# Altium footprint library FootPrintLib_10.PcbLib: 270 footprints (part 15 of 17)
Each footprint in its own frame and in the unit in brackets; x right, y up, seen from the top. Pads: shape width x height; smd on the part's side, far side on the other; paste and mask are expansions set on the pad; w line width, h text height; cw(c..) or ccw(c..) is an arc to the next point about the centre after c.
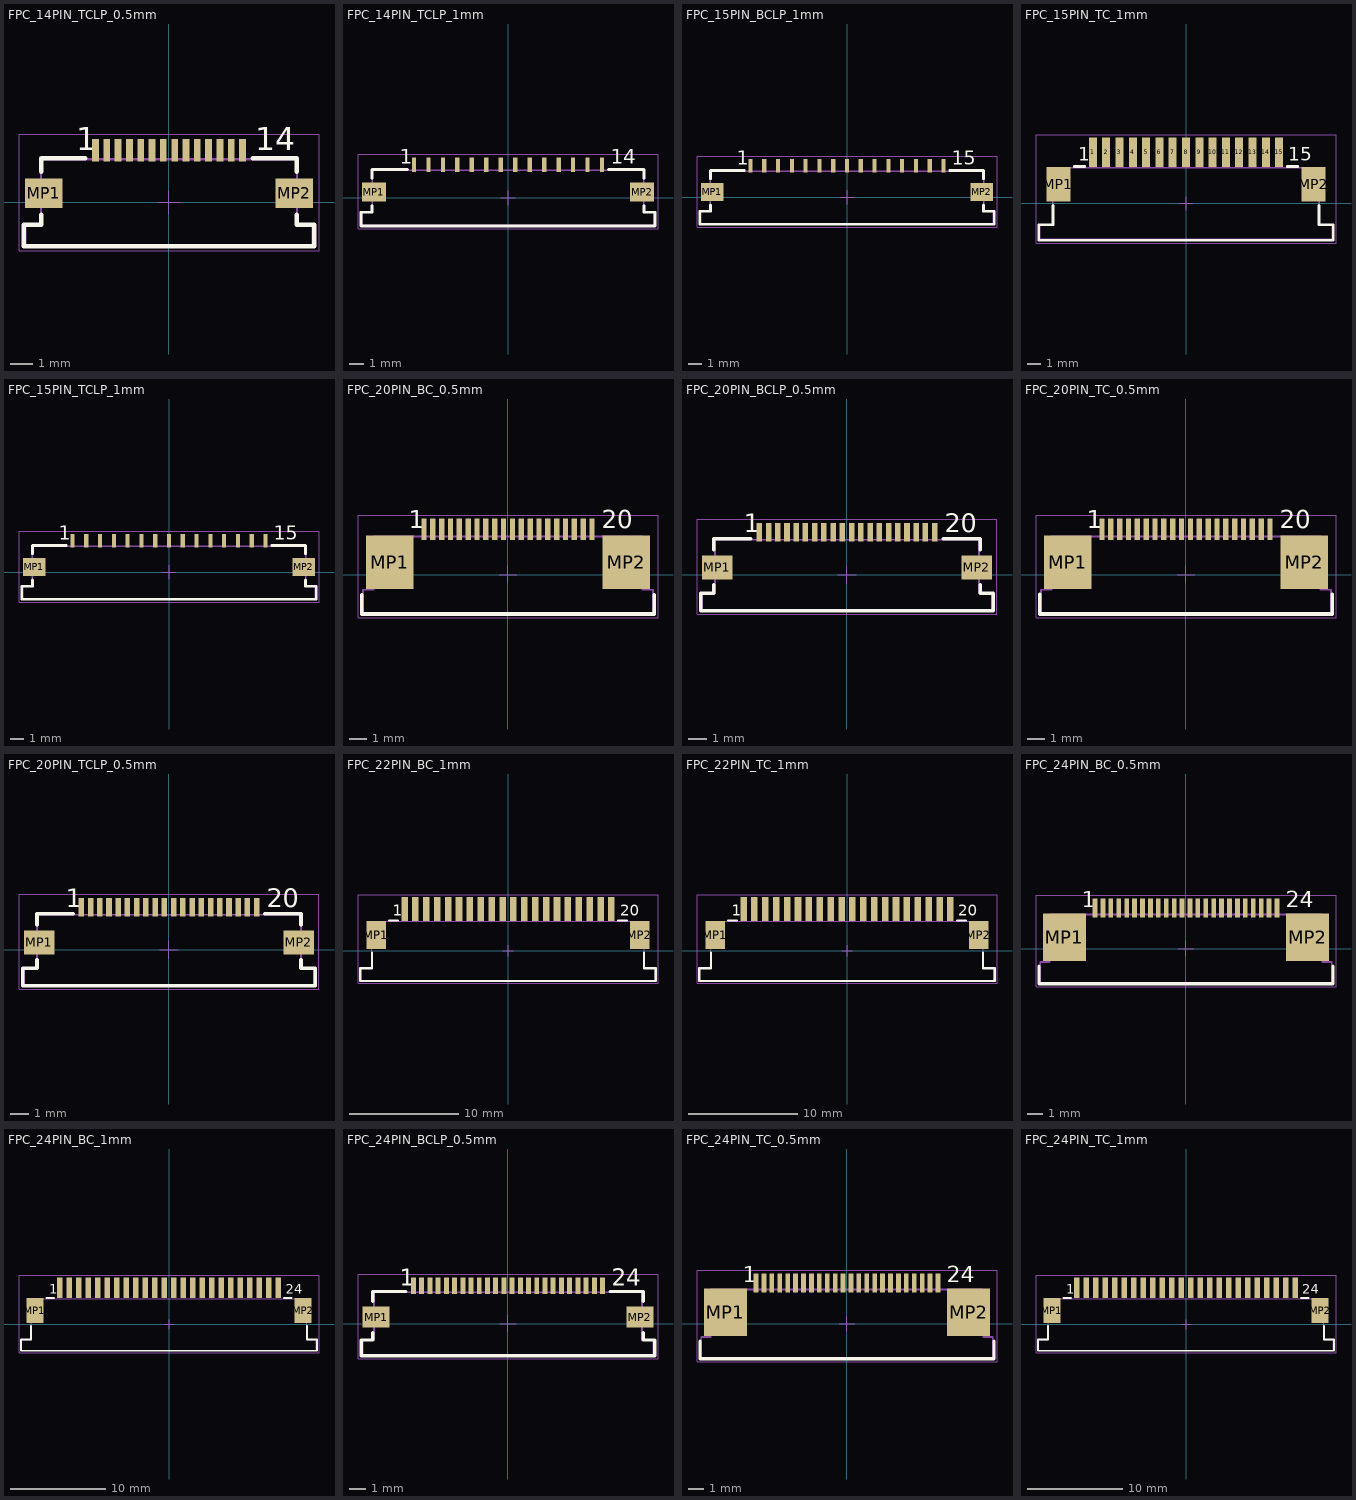
[diagram p14: the footprints below, top view; thin cyan lines are the x and y axes]

## FPC_14PIN_TCLP_0.5mm [mm] "ZIF Connectors, Horizontal, Top Contact Low Profile, pitch 0.5mm, 14p"
height 1.3
pads (16):
  rect 0.3x1 smd: 1(-3.25,2.3) 2(-2.75,2.3) 3(-2.25,2.3) 4(-1.75,2.3) 5(-1.25,2.3) 6(-0.75,2.3) 7(-0.25,2.3) 8(0.25,2.3) 9(0.75,2.3) 10(1.25,2.3) 11(1.75,2.3) 12(2.25,2.3) 13(2.75,2.3) 14(3.25,2.3)
  rect 1.65x1.3 smd: MP1(-5.525,0.4) MP2(5.525,0.4)
Top Overlay:
  lines w0.2: -5.65,-0.55 -5.65,-1 -6.425,-1 -6.425,-1.95 6.425,-1.95 6.425,-1 5.65,-1 5.65,-0.55 ; -5.65,1.35 -5.65,1.95 -3.7,1.95 ; 3.7,1.95 5.65,1.95 5.65,1.35
  text "14" at 3.8,2.3 h1.02
  text "1" at -4.1,2.3 h1.02
Mechanical 13:
  lines w0.1: -6.35,-1.9 -6.35,-1 -5.65,-1 -5.65,1.9 5.65,1.9 5.65,-1 6.35,-1 6.35,-1.9 -6.35,-1.9
Mechanical 15:
  lines w0.05: -0.5,0 0.5,0 ; 0,-0.5 0,0.5 ; -6.625,-2.15 -6.625,3 6.625,3 6.625,-2.15 -6.625,-2.15
3D body "687114183622.stp": height 1.28, standoff -0.01, extent -6.35,-1.9 6.35,2.35

## FPC_14PIN_TCLP_1mm [mm] "ZIF Connectors, Horizontal, Top Contact Low Profile, pitch 1mm, 14p"
height 1.3
pads (16):
  rect 0.3x1 smd: 1(-6.5,2.3) 2(-5.5,2.3) 3(-4.5,2.3) 4(-3.5,2.3) 5(-2.5,2.3) 6(-1.5,2.3) 7(-0.5,2.3) 8(0.5,2.3) 9(1.5,2.3) 10(2.5,2.3) 11(3.5,2.3) 12(4.5,2.3) 13(5.5,2.3) 14(6.5,2.3)
  rect 1.65x1.3 smd: MP1(-9.275,0.4) MP2(9.275,0.4)
Top Overlay:
  lines w0.2: -9.4,-0.55 -9.4,-1 -10.175,-1 -10.175,-1.95 10.175,-1.95 10.175,-1 9.4,-1 9.4,-0.55 ; -9.4,1.35 -9.4,1.95 -6.95,1.95 ; 6.95,1.95 9.4,1.95 9.4,1.35
  text "1" at -7.5,2.35 h1.02
  text "14" at 7.1,2.35 h1.02
Mechanical 13:
  lines w0.1: -10.1,-1 -10.1,-1.9 10.1,-1.9 10.1,-1 9.4,-1 9.4,1.9 -9.4,1.9 -9.4,-1 -10.1,-1 ; -10.1,-1 -10.1,-1
Mechanical 15:
  lines w0.05: -0.5,0 0.5,0 ; 0,-0.5 0,0.5 ; -10.375,-2.15 -10.375,3 10.375,3 10.375,-2.15 -10.375,-2.15
3D body "686114183422.stp": height 1.28, standoff -0.01, extent -10.1,-1.9 10.1,2.35

## FPC_15PIN_BCLP_1mm [mm] "ZIF Connectors, Horizontal, Bottom Contact Low Profile, pitch 1mm, 15p"
height 1.3
pads (17):
  rect 0.3x1 smd: 1(-7,2.3) 2(-6,2.3) 3(-5,2.3) 4(-4,2.3) 5(-3,2.3) 6(-2,2.3) 7(-1,2.3) 8(0,2.3) 9(1,2.3) 10(2,2.3) 11(3,2.3) 12(4,2.3) 13(5,2.3) 14(6,2.3) 15(7,2.3)
  rect 1.65x1.3 smd: MP1(-9.775,0.4) MP2(9.775,0.4)
Top Overlay:
  lines w0.2: -9.9,-0.55 -9.9,-1 -10.675,-1 -10.675,-1.95 10.675,-1.95 10.675,-1 9.9,-1 9.9,-0.55 ; -9.9,1.35 -9.9,1.95 -7.45,1.95 ; 7.45,1.95 9.9,1.95 9.9,1.35
  text "1" at -8,2.35 h1.02
  text "15" at 7.6,2.35 h1.02
Mechanical 13:
  lines w0.1: -10.6,-1 -10.6,-1.9 10.6,-1.9 10.6,-1 9.9,-1 9.9,1.9 -9.9,1.9 -9.9,-1 -10.6,-1 ; -10.6,-1 -10.6,-1
Mechanical 15:
  lines w0.05: -0.5,0 0.5,0 ; 0,-0.5 0,0.5 ; -10.875,-2.15 -10.875,3 10.875,3 10.875,-2.15 -10.875,-2.15
3D body "686115183522.stp": height 1.24, standoff -0.01, extent -10.6,-1.9 10.6,2.35

## FPC_15PIN_TC_1mm [mm] "ZIF Connectors, Horizontal, Top Contact, pitch 1mm, 15p"
height 3.15
pads (17):
  rect 0.6x2.2 smd: 1(-7,3.85) 2(-6,3.85) 3(-5,3.85) 4(-4,3.85) 5(-3,3.85) 6(-2,3.85) 7(-1,3.85) 8(0,3.85) 9(1,3.85) 10(2,3.85) 11(3,3.85) 12(4,3.85) 13(5,3.85) 14(6,3.85) 15(7,3.85)
  rect 1.8x2.6 smd: MP1(-9.6,1.45) MP2(9.6,1.45)
Top Overlay:
  lines w0.2: -10,-0.15 -10,-1.6 -11.075,-1.6 -11.075,-2.775 11.075,-2.775 11.075,-1.6 10,-1.6 10,-0.15 ; -8.4,2.775 -7.6,2.775 ; 7.6,2.775 8.4,2.775
  text "15" at 7.7,3.2 h1.02
  text "1" at -8.1,3.2 h1.02
Mechanical 13:
  lines w0.1: -11,-2.7 11,-2.7 11,-1.6 10,-1.6 10,2.7 -10,2.7 -10,-1.6 -11,-1.6 -11,-2.7
Mechanical 15:
  lines w0.05: -0.5,0 0.5,0 ; 0,-0.5 0,0.5 ; -11.275,-2.975 -11.275,5.15 11.275,5.15 11.275,-2.975 -11.275,-2.975
3D body "68611514122.stp": height 3.02, standoff 0.02, extent -11,-2.7 11,4.4

## FPC_15PIN_TCLP_1mm [mm] "ZIF Connectors, Horizontal, Top Contact Low Profile, pitch 1mm, 15p"
height 1.3
pads (17):
  rect 0.3x1 smd: 1(-7,2.3) 2(-6,2.3) 3(-5,2.3) 4(-4,2.3) 5(-3,2.3) 6(-2,2.3) 7(-1,2.3) 8(0,2.3) 9(1,2.3) 10(2,2.3) 11(3,2.3) 12(4,2.3) 13(5,2.3) 14(6,2.3) 15(7,2.3)
  rect 1.65x1.3 smd: MP1(-9.775,0.4) MP2(9.775,0.4)
Top Overlay:
  lines w0.2: -9.9,-0.55 -9.9,-1 -10.675,-1 -10.675,-1.95 10.675,-1.95 10.675,-1 9.9,-1 9.9,-0.55 ; -9.9,1.35 -9.9,1.95 -7.45,1.95 ; 7.45,1.95 9.9,1.95 9.9,1.35
  text "1" at -8,2.35 h1.02
  text "15" at 7.6,2.35 h1.02
Mechanical 13:
  lines w0.1: -10.6,-1 -9.9,-1 -9.9,1.9 9.9,1.9 9.9,-1 10.6,-1 10.6,-1.9 -10.6,-1.9 -10.6,-1 ; -10.6,-1 -10.6,-1
Mechanical 15:
  lines w0.05: -0.5,0 0.5,0 ; 0,-0.5 0,0.5 ; -10.875,-2.15 10.875,-2.15 10.875,3 -10.875,3 -10.875,-2.15
3D body "686115183422.stp": height 1.28, standoff -0.01, extent -10.6,-1.9 10.6,2.35

## FPC_20PIN_BC_0.5mm [mm] "ZIF Connectors, Horizontal, Bottom Contact, pitch 0.5mm, 20p"
height 2.25
pads (22):
  rect 0.3x1.2 smd: 1(-4.75,2.56) 2(-4.25,2.56) 3(-3.75,2.56) 4(-3.25,2.56) 5(-2.75,2.56) 6(-2.25,2.56) 7(-1.75,2.56) 8(-1.25,2.56) 9(-0.75,2.56) 10(-0.25,2.56) 11(0.25,2.56) 12(0.75,2.56) 13(1.25,2.56) 14(1.75,2.56) 15(2.25,2.56) 16(2.75,2.56) 17(3.25,2.56) 18(3.75,2.56) 19(4.25,2.56) 20(4.75,2.56)
  rect 2.7x3 smd: MP1(-6.68,0.7) MP2(6.68,0.7)
Top Overlay:
  lines w0.2: -8.275,-1.125 -8.275,-2.225 8.275,-2.225 8.275,-1.125
  text "1" at -5.6,2.61 h1.02
  text "20" at 5.3,2.61 h1.02
Mechanical 13:
  lines w0.1: -8.2,-2.15 8.2,-2.15 8.2,-0.85 7.6,-0.85 7.6,2.15 -7.6,2.15 -7.6,-0.85 -8.2,-0.85 -8.2,-2.15
Mechanical 15:
  lines w0.05: -0.5,0 0.5,0 ; 0,-0.5 0,0.5 ; -8.475,-2.425 -8.475,3.36 8.475,3.36 8.475,-2.425 -8.475,-2.425
3D body "68712014522.stp": height 2.1, standoff 0, extent -8.2,-2.15 8.2,2.95

## FPC_20PIN_BCLP_0.5mm [mm] "ZIF Connectors, Horizontal, Bottom Contact Low Profile, pitch 0.5mm, 20p"
height 1.3
pads (22):
  rect 0.3x1 smd: 1(-4.75,2.3) 2(-4.25,2.3) 3(-3.75,2.3) 4(-3.25,2.3) 5(-2.75,2.3) 6(-2.25,2.3) 7(-1.75,2.3) 8(-1.25,2.3) 9(-0.75,2.3) 10(-0.25,2.3) 11(0.25,2.3) 12(0.75,2.3) 13(1.25,2.3) 14(1.75,2.3) 15(2.25,2.3) 16(2.75,2.3) 17(3.25,2.3) 18(3.75,2.3) 19(4.25,2.3) 20(4.75,2.3)
  rect 1.65x1.3 smd: MP1(-7.025,0.4) MP2(7.025,0.4)
Top Overlay:
  lines w0.2: -7.225,-0.55 -7.225,-1 -7.925,-1 -7.925,-1.95 7.925,-1.95 7.925,-1 7.225,-1 7.225,-0.55 ; -7.225,1.35 -7.225,1.95 -5.225,1.95 ; 5.225,1.95 7.225,1.95 7.225,1.35
  text "20" at 5.3,2.3 h1.02
  text "1" at -5.6,2.3 h1.02
Mechanical 13:
  lines w0.1: -7.85,-1.9 -7.85,-1 -7.15,-1 -7.15,1.9 7.15,1.9 7.15,-1 7.85,-1 7.85,-1.9 -7.85,-1.9
Mechanical 15:
  lines w0.05: -0.5,0 0.5,0 ; 0,-0.5 0,0.5 ; -8.125,-2.15 -8.125,3 8.125,3 8.125,-2.15 -8.125,-2.15
3D body "687120183722.stp": height 1.28, standoff -0.01, extent -7.85,-1.9 7.85,2.35

## FPC_20PIN_TC_0.5mm [mm] "ZIF Connectors, Horizontal, Top Contact, pitch 0.5mm, 20p"
height 2.25
pads (22):
  rect 0.3x1.2 smd: 1(-4.75,2.56) 2(-4.25,2.56) 3(-3.75,2.56) 4(-3.25,2.56) 5(-2.75,2.56) 6(-2.25,2.56) 7(-1.75,2.56) 8(-1.25,2.56) 9(-0.75,2.56) 10(-0.25,2.56) 11(0.25,2.56) 12(0.75,2.56) 13(1.25,2.56) 14(1.75,2.56) 15(2.25,2.56) 16(2.75,2.56) 17(3.25,2.56) 18(3.75,2.56) 19(4.25,2.56) 20(4.75,2.56)
  rect 2.7x3 smd: MP1(-6.68,0.7) MP2(6.68,0.7)
Top Overlay:
  lines w0.2: -8.275,-1.1 -8.275,-2.225 8.275,-2.225 8.275,-1.1
  text "20" at 5.3,2.61 h1.02
  text "1" at -5.6,2.61 h1.02
Mechanical 13:
  lines w0.1: -8.2,-2.15 8.2,-2.15 8.2,-0.85 7.6,-0.85 7.6,2.15 -7.6,2.15 -7.6,-0.85 -8.2,-0.85 -8.2,-2.15
Mechanical 15:
  lines w0.05: -0.5,0 0.5,0 ; 0,-0.5 0,0.5 ; -8.475,-2.425 8.475,-2.425 8.475,3.36 -8.475,3.36 -8.475,-2.425
3D body "68712014022.stp": height 2.1, standoff 0, extent -8.2,-2.15 8.2,2.95

## FPC_20PIN_TCLP_0.5mm [mm] "ZIF Connectors, Horizontal, Top Contact Low Profile, pitch 0.5mm, 20p"
height 1.3
pads (22):
  rect 0.3x1 smd: 1(-4.75,2.3) 2(-4.25,2.3) 3(-3.75,2.3) 4(-3.25,2.3) 5(-2.75,2.3) 6(-2.25,2.3) 7(-1.75,2.3) 8(-1.25,2.3) 9(-0.75,2.3) 10(-0.25,2.3) 11(0.25,2.3) 12(0.75,2.3) 13(1.25,2.3) 14(1.75,2.3) 15(2.25,2.3) 16(2.75,2.3) 17(3.25,2.3) 18(3.75,2.3) 19(4.25,2.3) 20(4.75,2.3)
  rect 1.65x1.3 smd: MP1(-7.025,0.4) MP2(7.025,0.4)
Top Overlay:
  lines w0.2: -7.15,-0.55 -7.15,-1 -7.925,-1 -7.925,-1.95 7.925,-1.95 7.925,-1 7.15,-1 7.15,-0.55 ; -7.15,1.35 -7.15,1.95 -5.2,1.95 ; 5.2,1.95 7.15,1.95 7.15,1.35
  text "1" at -5.6,2.3 h1.02
  text "20" at 5.3,2.3 h1.02
Mechanical 13:
  lines w0.1: -7.85,-1.9 -7.85,-1 -7.15,-1 -7.15,1.9 7.15,1.9 7.15,-1 7.85,-1 7.85,-1.9 -7.85,-1.9
Mechanical 15:
  lines w0.05: -0.5,0 0.5,0 ; 0,-0.5 0,0.5 ; -8.125,-2.15 -8.125,3 8.125,3 8.125,-2.15 -8.125,-2.15
3D body "687120183622.stp": height 1.28, standoff -0.01, extent -7.85,-1.9 7.85,2.35

## FPC_22PIN_BC_1mm [mm] "ZIF Connectors, Horizontal, Bottom Contact, pitch 1mm, 20p"
height 3.15
pads (22):
  rect 0.6x2.2 smd: 1(-9.5,3.85) 2(-8.5,3.85) 3(-7.5,3.85) 4(-6.5,3.85) 5(-5.5,3.85) 6(-4.5,3.85) 7(-3.5,3.85) 8(-2.5,3.85) 9(-1.5,3.85) 10(-0.5,3.85) 11(0.5,3.85) 12(1.5,3.85) 13(2.5,3.85) 14(3.5,3.85) 15(4.5,3.85) 16(5.5,3.85) 17(6.5,3.85) 18(7.5,3.85) 19(8.5,3.85) 20(9.5,3.85)
  rect 1.8x2.6 smd: MP1(-12.1,1.45) MP2(12.1,1.45)
Top Overlay:
  lines w0.2: -12.5,-0.15 -12.5,-1.6 -13.575,-1.6 -13.575,-2.775 13.575,-2.775 13.575,-1.6 12.5,-1.6 12.5,-0.15 ; -10.9,2.775 -10.1,2.775 ; 10.1,2.775 10.9,2.775
  text "20" at 10.3,3.2 h1.02
  text "1" at -10.6,3.2 h1.02
Mechanical 13:
  lines w0.1: -13.5,-2.7 13.5,-2.7 13.5,-1.6 12.5,-1.6 12.5,2.7 -12.5,2.7 -12.5,-1.6 -13.5,-1.6 -13.5,-2.7
Mechanical 15:
  lines w0.05: -0.5,0 0.5,0 ; 0,-0.5 0,0.5 ; -13.775,-2.975 13.775,-2.975 13.775,5.15 -13.775,5.15 -13.775,-2.975
3D body "68612014422.stp": height 3.02, standoff 0.01, extent -13.5,-2.7 13.5,4.4

## FPC_22PIN_TC_1mm [mm] "ZIF Connectors, Horizontal, Top Contact, pitch 1mm, 20p"
height 3.15
pads (22):
  rect 0.6x2.2 smd: 1(-9.5,3.85) 2(-8.5,3.85) 3(-7.5,3.85) 4(-6.5,3.85) 5(-5.5,3.85) 6(-4.5,3.85) 7(-3.5,3.85) 8(-2.5,3.85) 9(-1.5,3.85) 10(-0.5,3.85) 11(0.5,3.85) 12(1.5,3.85) 13(2.5,3.85) 14(3.5,3.85) 15(4.5,3.85) 16(5.5,3.85) 17(6.5,3.85) 18(7.5,3.85) 19(8.5,3.85) 20(9.5,3.85)
  rect 1.8x2.6 smd: MP1(-12.1,1.45) MP2(12.1,1.45)
Top Overlay:
  lines w0.2: -12.5,-0.15 -12.5,-1.6 -13.575,-1.6 -13.575,-2.775 13.575,-2.775 13.575,-1.6 12.5,-1.6 12.5,-0.15 ; -10.9,2.775 -10.1,2.775 ; 10.1,2.775 10.9,2.775
  text "1" at -10.6,3.2 h1.02
  text "20" at 10.2,3.2 h1.02
Mechanical 13:
  lines w0.1: -13.5,-2.7 13.5,-2.7 13.5,-1.6 12.5,-1.6 12.5,2.7 -12.5,2.7 -12.5,-1.6 -13.5,-1.6 -13.5,-2.7
Mechanical 15:
  lines w0.05: -0.5,0 0.5,0 ; 0,-0.5 0,0.5 ; -13.775,-2.975 -13.775,5.15 13.775,5.15 13.775,-2.975 -13.775,-2.975
3D body "68612014122.stp": height 3.02, standoff 0.02, extent -13.5,-2.7 13.5,4.4

## FPC_24PIN_BC_0.5mm [mm] "ZIF Connectors, Horizontal, Bottom Contact, pitch 0.5mm, 24p"
height 2.25
pads (26):
  rect 0.3x1.2 smd: 1(-5.75,2.56) 2(-5.25,2.56) 3(-4.75,2.56) 4(-4.25,2.56) 5(-3.75,2.56) 6(-3.25,2.56) 7(-2.75,2.56) 8(-2.25,2.56) 9(-1.75,2.56) 10(-1.25,2.56) 11(-0.75,2.56) 12(-0.25,2.56) 13(0.25,2.56) 14(0.75,2.56) 15(1.25,2.56) 16(1.75,2.56) 17(2.25,2.56) 18(2.75,2.56) 19(3.25,2.56) 20(3.75,2.56) 21(4.25,2.56) 22(4.75,2.56) 23(5.25,2.56) 24(5.75,2.56)
  rect 2.7x3 smd: MP1(-7.68,0.7) MP2(7.68,0.7)
Top Overlay:
  lines w0.2: -9.275,-1.125 -9.275,-2.225 9.275,-2.225 9.275,-1.125
  text "24" at 6.3,2.61 h1.02
  text "1" at -6.6,2.61 h1.02
Mechanical 13:
  lines w0.1: -9.2,-2.15 -9.2,-0.85 -8.6,-0.85 -8.6,2.15 8.6,2.15 8.6,-0.85 9.2,-0.85 9.2,-2.15 -9.2,-2.15
Mechanical 15:
  lines w0.05: -0.5,0 0.5,0 ; 0,-0.5 0,0.5 ; -9.475,-2.425 9.475,-2.425 9.475,3.36 -9.475,3.36 -9.475,-2.425
3D body "68712414522.stp": height 2.1, standoff 0, extent -9.2,-2.15 9.2,2.95

## FPC_24PIN_BC_1mm [mm] "ZIF Connectors, Horizontal, Bottom Contact, pitch 1mm, 24p"
height 3.15
pads (26):
  rect 0.6x2.2 smd: 1(-11.5,3.85) 2(-10.5,3.85) 3(-9.5,3.85) 4(-8.5,3.85) 5(-7.5,3.85) 6(-6.5,3.85) 7(-5.5,3.85) 8(-4.5,3.85) 9(-3.5,3.85) 10(-2.5,3.85) 11(-1.5,3.85) 12(-0.5,3.85) 13(0.5,3.85) 14(1.5,3.85) 15(2.5,3.85) 16(3.5,3.85) 17(4.5,3.85) 18(5.5,3.85) 19(6.5,3.85) 20(7.5,3.85) 21(8.5,3.85) 22(9.5,3.85) 23(10.5,3.85) 24(11.5,3.85)
  rect 1.8x2.6 smd: MP1(-14.1,1.45) MP2(14.1,1.45)
Top Overlay:
  lines w0.2: -14.5,-0.15 -14.5,-1.6 -15.575,-1.6 -15.575,-2.775 15.575,-2.775 15.575,-1.6 14.5,-1.6 14.5,-0.15 ; -12.9,2.775 -12.1,2.775 ; 12.1,2.775 12.9,2.775
  text "1" at -12.6,3.2 h1.02
  text "24" at 12.3,3.2 h1.02
Mechanical 13:
  lines w0.1: -15.5,-2.7 15.5,-2.7 15.5,-1.6 14.5,-1.6 14.5,2.7 -14.5,2.7 -14.5,-1.6 -15.5,-1.6 -15.5,-2.7
Mechanical 15:
  lines w0.05: -0.5,0 0.5,0 ; 0,-0.5 0,0.5 ; -15.775,-2.975 15.775,-2.975 15.775,5.15 -15.775,5.15 -15.775,-2.975
3D body "68612414422.stp": height 3.02, standoff 0.01, extent -15.5,-2.7 15.5,4.4

## FPC_24PIN_BCLP_0.5mm [mm] "ZIF Connectors, Horizontal, Bottom Contact Low Profile, pitch 0.5mm, 24p"
height 1.3
pads (26):
  rect 0.3x1 smd: 1(-5.75,2.3) 2(-5.25,2.3) 3(-4.75,2.3) 4(-4.25,2.3) 5(-3.75,2.3) 6(-3.25,2.3) 7(-2.75,2.3) 8(-2.25,2.3) 9(-1.75,2.3) 10(-1.25,2.3) 11(-0.75,2.3) 12(-0.25,2.3) 13(0.25,2.3) 14(0.75,2.3) 15(1.25,2.3) 16(1.75,2.3) 17(2.25,2.3) 18(2.75,2.3) 19(3.25,2.3) 20(3.75,2.3) 21(4.25,2.3) 22(4.75,2.3) 23(5.25,2.3) 24(5.75,2.3)
  rect 1.65x1.3 smd: MP1(-8.025,0.4) MP2(8.025,0.4)
Top Overlay:
  lines w0.2: -8.225,-0.55 -8.225,-1 -8.925,-1 -8.925,-1.95 8.925,-1.95 8.925,-1 8.225,-1 8.225,-0.55 ; -8.225,1.35 -8.225,1.95 -6.225,1.95 ; 6.225,1.95 8.225,1.95 8.225,1.35
  text "1" at -6.6,2.3 h1.02
  text "24" at 6.3,2.3 h1.02
Mechanical 13:
  lines w0.1: -8.85,-1.9 8.85,-1.9 8.85,-1 8.15,-1 8.15,1.9 -8.15,1.9 -8.15,-1 -8.85,-1 -8.85,-1.9
Mechanical 15:
  lines w0.05: -0.5,0 0.5,0 ; 0,-0.5 0,0.5 ; -9.125,-2.15 9.125,-2.15 9.125,3 -9.125,3 -9.125,-2.15
3D body "687124183722.stp": height 1.28, standoff -0.01, extent -8.85,-1.9 8.85,2.35

## FPC_24PIN_TC_0.5mm [mm] "ZIF Connectors, Horizontal, Top Contact, pitch 0.5mm, 24p"
height 2.25
pads (26):
  rect 0.3x1.2 smd: 1(-5.75,2.56) 2(-5.25,2.56) 3(-4.75,2.56) 4(-4.25,2.56) 5(-3.75,2.56) 6(-3.25,2.56) 7(-2.75,2.56) 8(-2.25,2.56) 9(-1.75,2.56) 10(-1.25,2.56) 11(-0.75,2.56) 12(-0.25,2.56) 13(0.25,2.56) 14(0.75,2.56) 15(1.25,2.56) 16(1.75,2.56) 17(2.25,2.56) 18(2.75,2.56) 19(3.25,2.56) 20(3.75,2.56) 21(4.25,2.56) 22(4.75,2.56) 23(5.25,2.56) 24(5.75,2.56)
  rect 2.7x3 smd: MP1(-7.68,0.7) MP2(7.68,0.7)
Top Overlay:
  lines w0.2: -9.275,-1.1 -9.275,-2.225 9.275,-2.225 9.275,-1.1
  text "24" at 6.3,2.61 h1.02
  text "1" at -6.6,2.61 h1.02
Mechanical 13:
  lines w0.1: -9.2,-2.15 9.2,-2.15 9.2,-0.85 8.6,-0.85 8.6,2.15 -8.6,2.15 -8.6,-0.85 -9.2,-0.85 -9.2,-2.15
Mechanical 15:
  lines w0.05: -0.5,0 0.5,0 ; 0,-0.5 0,0.5 ; -9.475,-2.425 9.475,-2.425 9.475,3.36 -9.475,3.36 -9.475,-2.425
3D body "68712414022.stp": height 2.1, standoff 0, extent -9.2,-2.15 9.2,2.95

## FPC_24PIN_TC_1mm [mm] "ZIF Connectors, Horizontal, Top Contact, pitch 1mm, 24p"
height 3.15
pads (26):
  rect 0.6x2.2 smd: 1(-11.5,3.85) 2(-10.5,3.85) 3(-9.5,3.85) 4(-8.5,3.85) 5(-7.5,3.85) 6(-6.5,3.85) 7(-5.5,3.85) 8(-4.5,3.85) 9(-3.5,3.85) 10(-2.5,3.85) 11(-1.5,3.85) 12(-0.5,3.85) 13(0.5,3.85) 14(1.5,3.85) 15(2.5,3.85) 16(3.5,3.85) 17(4.5,3.85) 18(5.5,3.85) 19(6.5,3.85) 20(7.5,3.85) 21(8.5,3.85) 22(9.5,3.85) 23(10.5,3.85) 24(11.5,3.85)
  rect 1.8x2.6 smd: MP1(-14.1,1.45) MP2(14.1,1.45)
Top Overlay:
  lines w0.2: -14.5,-0.15 -14.5,-1.6 -15.575,-1.6 -15.575,-2.775 15.575,-2.775 15.575,-1.6 14.5,-1.6 14.5,-0.15 ; -12.9,2.775 -12.1,2.775 ; 12.1,2.775 12.9,2.775
  text "24" at 12.2,3.2 h1.02
  text "1" at -12.6,3.2 h1.02
Mechanical 13:
  lines w0.1: -15.5,-2.7 -15.5,-1.6 -14.5,-1.6 -14.5,2.7 14.5,2.7 14.5,-1.6 15.5,-1.6 15.5,-2.7 -15.5,-2.7
Mechanical 15:
  lines w0.05: -0.5,0 0.5,0 ; 0,-0.5 0,0.5 ; -15.775,-2.975 15.775,-2.975 15.775,5.15 -15.775,5.15 -15.775,-2.975
3D body "68612414122.stp": height 3.02, standoff 0.02, extent -15.5,-2.7 15.5,4.4